# Altium footprint library 2020-05-10_15-02-10.PcbLib: 3 footprints
Each footprint in its own frame and in the unit in brackets; x right, y up, seen from the top. Pads: shape width x height; smd on the part's side, far side on the other; paste and mask are expansions set on the pad; w line width, h text height; cw(c..) or ccw(c..) is an arc to the next point about the centre after c.
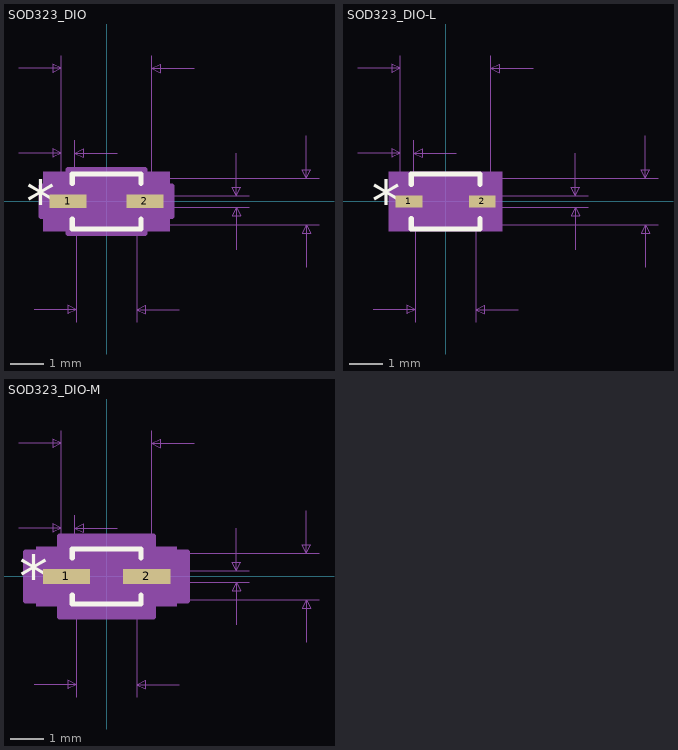
[diagram p0: the footprints below, top view; thin cyan lines are the x and y axes]

## SOD323_DIO [mm]
pads (2):
  rect 1.111x0.401 smd paste+0 mask+0: 1(-1.15,0) 2(1.15,0)
Top Overlay:
  lines w0.152: -1.027,-0.533 -1.027,-0.827 1.027,-0.827 1.027,-0.533 ; -1.027,0.533 -1.027,0.827 1.027,0.827 1.027,0.533
  text "*" at -2.404,-0.635 h1.27
Mechanical 5:
  region: 1.896,-0.891 -1.896,-0.891 -1.896,0.891 1.896,0.891
Mechanical 7:
  lines w0.025: -2.62,1.445 -1.35,1.445 ; -2.62,3.985 -1.35,3.985 ; -2.17,-3.24 -0.9,-3.24 ; -1.35,1.826 -1.35,0 -1.35,4.366 ; -0.95,0 -0.95,1.826 ; -0.9,-3.621 -0.9,0 ; 0,-0.7 6.361,-0.7 ; 0,0.7 6.361,0.7 ; 0.32,1.445 -0.95,1.445 ; 0.9,-3.621 0.9,0 ; 1.35,-0.175 4.271,-0.175 ; 1.35,0 1.35,4.366 ; 1.35,0.175 4.271,0.175 ; 2.17,-3.24 0.9,-3.24 ; 2.62,3.985 1.35,3.985 ; 3.89,-1.445 3.89,-0.175 ; 3.89,1.445 3.89,0.175 ; 5.98,-1.97 5.98,-0.7 ; 5.98,1.97 5.98,0.7 ; -1.35,1.445 -1.604,1.572 -1.604,1.318 -1.35,1.445 ; -1.35,3.985 -1.604,4.112 -1.604,3.858 -1.35,3.985 ; -0.95,1.445 -0.696,1.572 -0.696,1.318 -0.95,1.445 ; -0.9,-3.24 -1.154,-3.113 -1.154,-3.367 -0.9,-3.24 ; 0.9,-3.24 1.154,-3.113 1.154,-3.367 0.9,-3.24 ; 1.35,3.985 1.604,4.112 1.604,3.858 1.35,3.985 ; 3.89,-0.175 3.763,-0.429 4.017,-0.429 3.89,-0.175 ; 3.89,0.175 3.763,0.429 4.017,0.429 3.89,0.175 ; 5.98,-0.7 5.853,-0.954 6.107,-0.954 5.98,-0.7 ; 5.98,0.7 5.853,0.954 6.107,0.954 5.98,0.7
  text "Default Padstyle: RX43p75Y15p78D0T" at -10.795,-8.455 h1.27
  text "Alt 1 Padstyle: OX60Y90D30P" at -8.572,-10.36 h1.27
  text "Alt 2 Padstyle: OX90Y60D30P" at -8.572,-12.265 h1.27
  text "0.106in/2.7mm" at -2.064,4.493 h0.64
  text "0.016in/0.4mm" at -3.214,1.953 h0.64
  text "0.014in/0.35mm" at 4.398,-0.318 h0.64
  text "0.055in/1.4mm" at 6.488,-0.318 h0.64
  text "0.071in/1.8mm" at -2.064,-4.383 h0.64
Mechanical 13:
  lines w0.025: -0.9,-0.35 -0.55,-0.7 ; -0.9,0.35 -0.55,0.7 ; -1.35,-0.175 -1.35,0.175 -0.9,0.175 -0.9,-0.175 -1.35,-0.175 ; -0.9,-0.7 0.9,-0.7 0.9,0.7 -0.9,0.7 -0.9,-0.7 ; 0.9,-0.175 0.9,0.175 1.35,0.175 1.35,-0.175 0.9,-0.175
  text "*" at -0.964,-0.635 h1.27
Mechanical 15:
  region: -1.154,-0.454 -1.96,-0.454 -1.96,0.454 -1.154,0.454 -1.154,0.954 1.154,0.954 1.154,0.454 1.96,0.454 1.96,-0.454 1.154,-0.454 1.154,-0.954 -1.154,-0.954
  lines w0.152: -1.96,-0.454 -1.96,0.454 -1.154,0.454 -1.154,0.954 1.154,0.954 1.154,0.454 1.96,0.454 1.96,-0.454 1.154,-0.454 1.154,-0.954 -1.154,-0.954 -1.154,-0.454 -1.96,-0.454
3D body: height 0.25, standoff 0, extent 0,0 0.254,0.254

## SOD323_DIO-L [mm]
pads (2):
  rect 0.806x0.35 smd paste+0 mask+0: 1(-1.099,0) 2(1.099,0)
Top Overlay:
  lines w0.152: -1.027,-0.508 -1.027,-0.827 1.027,-0.827 1.027,-0.508 ; -1.027,0.508 -1.027,0.827 1.027,0.827 1.027,0.508
  text "*" at -2.201,-0.635 h1.27
Mechanical 5:
  region: 1.693,-0.891 -1.693,-0.891 -1.693,0.891 1.693,0.891
Mechanical 7:
  lines w0.025: -2.62,1.445 -1.35,1.445 ; -2.62,3.985 -1.35,3.985 ; -2.17,-3.24 -0.9,-3.24 ; -1.35,1.826 -1.35,0 -1.35,4.366 ; -0.95,0 -0.95,1.826 ; -0.9,-3.621 -0.9,0 ; 0,-0.7 6.361,-0.7 ; 0,0.7 6.361,0.7 ; 0.32,1.445 -0.95,1.445 ; 0.9,-3.621 0.9,0 ; 1.35,-0.175 4.271,-0.175 ; 1.35,0 1.35,4.366 ; 1.35,0.175 4.271,0.175 ; 2.17,-3.24 0.9,-3.24 ; 2.62,3.985 1.35,3.985 ; 3.89,-1.445 3.89,-0.175 ; 3.89,1.445 3.89,0.175 ; 5.98,-1.97 5.98,-0.7 ; 5.98,1.97 5.98,0.7 ; -1.35,1.445 -1.604,1.572 -1.604,1.318 -1.35,1.445 ; -1.35,3.985 -1.604,4.112 -1.604,3.858 -1.35,3.985 ; -0.95,1.445 -0.696,1.572 -0.696,1.318 -0.95,1.445 ; -0.9,-3.24 -1.154,-3.113 -1.154,-3.367 -0.9,-3.24 ; 0.9,-3.24 1.154,-3.113 1.154,-3.367 0.9,-3.24 ; 1.35,3.985 1.604,4.112 1.604,3.858 1.35,3.985 ; 3.89,-0.175 3.763,-0.429 4.017,-0.429 3.89,-0.175 ; 3.89,0.175 3.763,0.429 4.017,0.429 3.89,0.175 ; 5.98,-0.7 5.853,-0.954 6.107,-0.954 5.98,-0.7 ; 5.98,0.7 5.853,0.954 6.107,0.954 5.98,0.7
  text "Default Padstyle: RX31p75Y13p78D0T" at -10.795,-8.43 h1.27
  text "Alt 1 Padstyle: OX60Y90D30P" at -8.572,-10.335 h1.27
  text "Alt 2 Padstyle: OX90Y60D30P" at -8.572,-12.24 h1.27
  text "0.106in/2.7mm" at -2.064,4.493 h0.64
  text "0.016in/0.4mm" at -3.214,1.953 h0.64
  text "0.014in/0.35mm" at 4.398,-0.318 h0.64
  text "0.055in/1.4mm" at 6.488,-0.318 h0.64
  text "0.071in/1.8mm" at -2.064,-4.383 h0.64
Mechanical 13:
  lines w0.025: -0.9,-0.35 -0.55,-0.7 ; -0.9,0.35 -0.55,0.7 ; -1.35,-0.175 -1.35,0.175 -0.9,0.175 -0.9,-0.175 -1.35,-0.175 ; -0.9,-0.7 0.9,-0.7 0.9,0.7 -0.9,0.7 -0.9,-0.7 ; 0.9,-0.175 0.9,0.175 1.35,0.175 1.35,-0.175 0.9,-0.175
  text "*" at -0.964,-0.635 h1.27
Mechanical 15:
  region: -1.002,-0.277 -1.604,-0.277 -1.604,0.277 -1.002,0.277 -1.002,0.802 1.002,0.802 1.002,0.277 1.604,0.277 1.604,-0.277 1.002,-0.277 1.002,-0.802 -1.002,-0.802
  lines w0.152: -1.604,-0.277 -1.604,0.277 -1.002,0.277 -1.002,0.802 1.002,0.802 1.002,0.277 1.604,0.277 1.604,-0.277 1.002,-0.277 1.002,-0.802 -1.002,-0.802 -1.002,-0.277 -1.604,-0.277
3D body: height 0.25, standoff 0, extent 0,0 0.254,0.254

## SOD323_DIO-M [mm]
pads (2):
  rect 1.416x0.452 smd paste+0 mask+0: 1(-1.201,0) 2(1.201,0)
Top Overlay:
  lines w0.152: -1.027,-0.559 -1.027,-0.827 1.027,-0.827 1.027,-0.559 ; -1.027,0.559 -1.027,0.827 1.027,0.827 1.027,0.559
  text "*" at -2.607,-0.635 h1.27
Mechanical 5:
  region: 2.099,-0.891 -2.099,-0.891 -2.099,0.891 2.099,0.891
Mechanical 7:
  lines w0.025: -2.62,1.445 -1.35,1.445 ; -2.62,3.985 -1.35,3.985 ; -2.17,-3.24 -0.9,-3.24 ; -1.35,1.826 -1.35,0 -1.35,4.366 ; -0.95,0 -0.95,1.826 ; -0.9,-3.621 -0.9,0 ; 0,-0.7 6.361,-0.7 ; 0,0.7 6.361,0.7 ; 0.32,1.445 -0.95,1.445 ; 0.9,-3.621 0.9,0 ; 1.35,-0.175 4.271,-0.175 ; 1.35,0 1.35,4.366 ; 1.35,0.175 4.271,0.175 ; 2.17,-3.24 0.9,-3.24 ; 2.62,3.985 1.35,3.985 ; 3.89,-1.445 3.89,-0.175 ; 3.89,1.445 3.89,0.175 ; 5.98,-1.97 5.98,-0.7 ; 5.98,1.97 5.98,0.7 ; -1.35,1.445 -1.604,1.572 -1.604,1.318 -1.35,1.445 ; -1.35,3.985 -1.604,4.112 -1.604,3.858 -1.35,3.985 ; -0.95,1.445 -0.696,1.572 -0.696,1.318 -0.95,1.445 ; -0.9,-3.24 -1.154,-3.113 -1.154,-3.367 -0.9,-3.24 ; 0.9,-3.24 1.154,-3.113 1.154,-3.367 0.9,-3.24 ; 1.35,3.985 1.604,4.112 1.604,3.858 1.35,3.985 ; 3.89,-0.175 3.763,-0.429 4.017,-0.429 3.89,-0.175 ; 3.89,0.175 3.763,0.429 4.017,0.429 3.89,0.175 ; 5.98,-0.7 5.853,-0.954 6.107,-0.954 5.98,-0.7 ; 5.98,0.7 5.853,0.954 6.107,0.954 5.98,0.7
  text "Default Padstyle: RX55p75Y17p78D0T" at -10.795,-8.481 h1.27
  text "Alt 1 Padstyle: OX60Y90D30P" at -8.572,-10.386 h1.27
  text "Alt 2 Padstyle: OX90Y60D30P" at -8.572,-12.291 h1.27
  text "0.106in/2.7mm" at -2.064,4.493 h0.64
  text "0.016in/0.4mm" at -3.214,1.953 h0.64
  text "0.014in/0.35mm" at 4.398,-0.318 h0.64
  text "0.055in/1.4mm" at 6.488,-0.318 h0.64
  text "0.071in/1.8mm" at -2.064,-4.383 h0.64
Mechanical 13:
  lines w0.025: -0.9,-0.35 -0.55,-0.7 ; -0.9,0.35 -0.55,0.7 ; -1.35,-0.175 -1.35,0.175 -0.9,0.175 -0.9,-0.175 -1.35,-0.175 ; -0.9,-0.7 0.9,-0.7 0.9,0.7 -0.9,0.7 -0.9,-0.7 ; 0.9,-0.175 0.9,0.175 1.35,0.175 1.35,-0.175 0.9,-0.175
  text "*" at -0.964,-0.635 h1.27
Mechanical 15:
  region: -1.408,-0.734 -2.417,-0.734 -2.417,0.734 -1.408,0.734 -1.408,1.208 1.408,1.208 1.408,0.734 2.417,0.734 2.417,-0.734 1.408,-0.734 1.408,-1.208 -1.408,-1.208
  lines w0.152: -2.417,-0.734 -2.417,0.734 -1.408,0.734 -1.408,1.208 1.408,1.208 1.408,0.734 2.417,0.734 2.417,-0.734 1.408,-0.734 1.408,-1.208 -1.408,-1.208 -1.408,-0.734 -2.417,-0.734
3D body: height 0.25, standoff 0, extent 0,0 0.254,0.254